# Altium footprint library FootPrintLib_11.PcbLib: 376 footprints (part 6 of 24)
Each footprint in its own frame and in the unit in brackets; x right, y up, seen from the top. Pads: shape width x height; smd on the part's side, far side on the other; paste and mask are expansions set on the pad; w line width, h text height; cw(c..) or ccw(c..) is an arc to the next point about the centre after c.
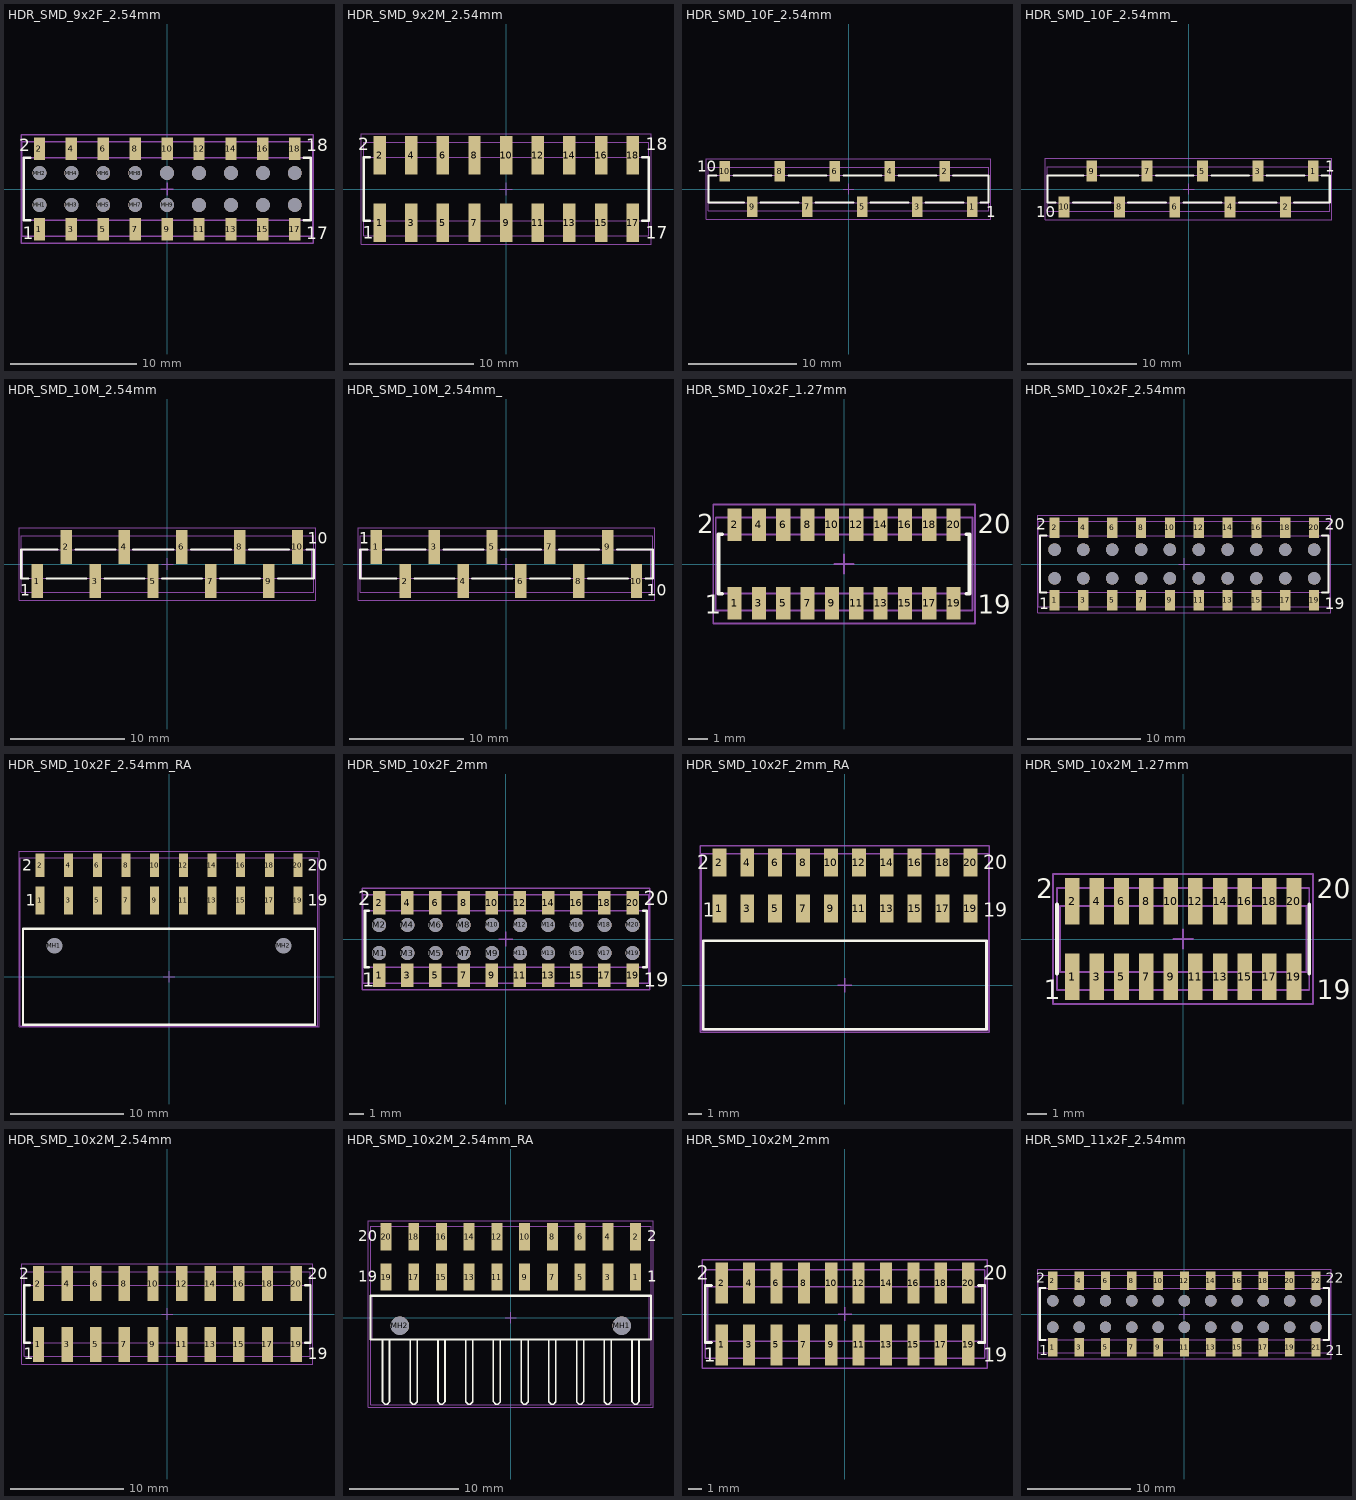
[diagram p5: the footprints below, top view; thin cyan lines are the x and y axes]

## HDR_SMD_9x2F_2.54mm [mm] "Socket Header, Pitch 2.54 mm, SMT, Vertical, dual row, 18p"
height 3.7
pads (36):
  rect 0.9x1.8 smd: 1(-10.16,-3.2) 2(-10.16,3.2) 3(-7.62,-3.2) 4(-7.62,3.2) 5(-5.08,-3.2) 6(-5.08,3.2) 7(-2.54,-3.2) 8(-2.54,3.2) 9(0,-3.2) 10(0,3.2) 11(2.54,-3.2) 12(2.54,3.2) 13(5.08,-3.2) 14(5.08,3.2) 15(7.62,-3.2) 16(7.62,3.2) 17(10.16,-3.2) 18(10.16,3.2)
  round 1.1 hole 1.1 unplated: MH1(-10.16,-1.27) MH2(-10.16,1.27) MH3(-7.62,-1.27) MH4(-7.62,1.27) MH5(-5.08,-1.27) MH6(-5.08,1.27) MH7(-2.54,-1.27) MH8(-2.54,1.27) MH9(0,-1.27) MH10(0,1.27) MH11(2.54,-1.27) MH12(2.54,1.27) MH13(5.08,-1.27) MH14(5.08,1.27) MH15(7.62,-1.27) MH16(7.62,1.27) MH17(10.16,-1.27) MH18(10.16,1.27)
Top Overlay:
  lines w0.2: -10.89,-2.5 -11.43,-2.5 -11.43,2.5 -10.89,2.5 ; 10.89,-2.5 11.43,-2.5 11.43,2.5 10.89,2.5
  text "2" at -11.79,3 h1
  text "1" at -11.49,-4 h1
  text "18" at 11.09,3 h1
  text "17" at 11.09,-4 h1
Mechanical 11:
  lines w0.1: -11.43,-2.5 11.43,-2.5 11.43,2.5 -11.43,2.5 -11.43,-2.5
Mechanical 13:
  lines w0.1: -11.58,-3.75 11.58,-3.75 11.58,3.75 -11.58,3.75 -11.58,-3.75
Mechanical 15:
  lines w0.1: -0.5,0 0.5,0 ; 0,-0.5 0,0.5 ; -11.63,-4.3 11.63,-4.3 11.63,4.3 -11.63,4.3 -11.63,-4.3
3D body "610018243021.stp": height 3.7, standoff 0, extent -11.43,-3.603 11.43,3.603

## HDR_SMD_9x2M_2.54mm [mm] "Pin Header, pitch 2.54 mm, SMD, Vertical, dual row, 18p"
height 9.6
pads (18):
  rect 1x3.1 smd: 1(-10.16,-2.7) 2(-10.16,2.7) 3(-7.62,-2.7) 4(-7.62,2.7) 5(-5.08,-2.7) 6(-5.08,2.7) 7(-2.54,-2.7) 8(-2.54,2.7) 9(0,-2.7) 10(0,2.7) 11(2.54,-2.7) 12(2.54,2.7) 13(5.08,-2.7) 14(5.08,2.7) 15(7.62,-2.7) 16(7.62,2.7) 17(10.16,-2.7) 18(10.16,2.7)
Top Overlay:
  lines w0.2: -10.94,-2.54 -11.43,-2.54 -11.43,2.54 -10.94,2.54 ; 10.94,-2.54 11.43,-2.54 11.43,2.54 10.94,2.54
  text "18" at 11.19,3.1 h1
  text "17" at 11.19,-4 h1
  text "1" at -11.49,-4 h1
  text "2" at -11.89,3.1 h1
Mechanical 11:
  lines w0.1: -11.43,-2.54 11.43,-2.54 11.43,2.54 -11.43,2.54 -11.43,-2.54
Mechanical 13:
  lines w0.1: -11.43,-3.75 -11.43,3.75 11.43,3.75 11.43,-3.75 -11.43,-3.75
Mechanical 15:
  lines w0.1: -0.5,0 0.5,0 ; 0,-0.5 0,0.5 ; -11.63,-4.45 -11.63,4.45 11.63,4.45 11.63,-4.45 -11.63,-4.45
3D body "61001821121.stp": height 9.62, standoff 0.02, extent -11.43,-3.75 11.43,3.75

## HDR_SMD_10F_2.54mm [mm] "Socket Header, Pitch 2.54 mm, SMT, Vertical, single row, 10p"
height 7.5
pads (10):
  rect 1x1.91 smd: 1(11.43,-1.645) 2(8.89,1.645) 3(6.35,-1.645) 4(3.81,1.645) 5(1.27,-1.645) 6(-1.27,1.645) 7(-3.81,-1.645) 8(-6.35,1.645) 9(-8.89,-1.645) 10(-11.43,1.645)
Top Overlay:
  lines w0.2: -12.22,1.25 -12.95,1.25 -12.95,-1.25 -9.67,-1.25 ; -10.62,1.25 -7.12,1.25 ; -8.12,-1.25 -4.62,-1.25 ; -5.54,1.25 -2.04,1.25 ; -3.04,-1.25 0.46,-1.25 ; -0.46,1.25 3.04,1.25 ; 2.04,-1.25 5.54,-1.25 ; 4.62,1.25 8.12,1.25 ; 7.12,-1.25 10.62,-1.25 ; 9.67,1.25 12.95,1.25 12.95,-1.25 12.22,-1.25
  text "1" at 12.72,-2.6 h1
  text "10" at -14,1.6 h1
Mechanical 11:
  lines w0.1: -12.95,-1.25 12.95,-1.25 12.95,1.25 -12.95,1.25 -12.95,-1.25
Mechanical 13:
  lines w0.1: -12.95,-2.025 12.95,-2.025 12.95,2.025 -12.95,2.025 -12.95,-2.025
Mechanical 15:
  lines w0.1: -0.5,0 0.5,0 ; 0,-0.5 0,0.5 ; -13.15,-2.8 13.15,-2.8 13.15,2.8 -13.15,2.8 -13.15,-2.8
3D body "61001011921.stp": height 7.5, standoff 0, extent -12.95,-2.025 12.95,2.025

## HDR_SMD_10F_2.54mm_ [mm] "Socket Header, Pitch 2.54 mm, SMT, Vertical, single row, 10p"
height 7.5
pads (10):
  rect 1x1.91 smd: 1(11.43,1.645) 2(8.89,-1.645) 3(6.35,1.645) 4(3.81,-1.645) 5(1.27,1.645) 6(-1.27,-1.645) 7(-3.81,1.645) 8(-6.35,-1.645) 9(-8.89,1.645) 10(-11.43,-1.645)
Top Overlay:
  lines w0.2: -12.22,-1.25 -12.95,-1.25 -12.95,1.25 -9.67,1.25 ; -10.62,-1.25 -7.17,-1.25 ; -8.07,1.25 -4.62,1.25 ; -5.54,-1.25 -2.09,-1.25 ; -2.99,1.25 0.46,1.25 ; -0.46,-1.25 2.99,-1.25 ; 2.09,1.25 5.54,1.25 ; 4.62,-1.25 8.07,-1.25 ; 7.17,1.25 10.62,1.25 ; 9.67,-1.25 12.95,-1.25 12.95,1.25 12.22,1.25
  text "1" at 12.52,1.6 h1
  text "10" at -14,-2.6 h1
Mechanical 11:
  lines w0.1: -12.95,-1.25 12.95,-1.25 12.95,1.25 -12.95,1.25 -12.95,-1.25
Mechanical 13:
  lines w0.1: -12.95,-2.025 -12.95,2.025 12.95,2.025 12.95,-2.025 -12.95,-2.025
Mechanical 15:
  lines w0.1: -0.5,0 0.5,0 ; 0,-0.5 0,0.5 ; -13.15,-2.8 -13.15,2.8 13.15,2.8 13.15,-2.8 -13.15,-2.8
3D body "61001013321.stp": height 7.5, standoff 0, extent -12.95,-2.025 12.95,2.025

## HDR_SMD_10M_2.54mm [mm] "Pin Header, pitch 2.54 mm, SMD, Vertical, single row, 10p"
height 9.3
pads (10):
  rect 1x3 smd: 1(-11.43,-1.5) 2(-8.89,1.5) 3(-6.35,-1.5) 4(-3.81,1.5) 5(-1.27,-1.5) 6(1.27,1.5) 7(3.81,-1.5) 8(6.35,1.5) 9(8.89,-1.5) 10(11.43,1.5)
Top Overlay:
  lines w0.2: -12.22,-1.27 -12.85,-1.27 -12.85,1.27 -9.67,1.27 ; -10.62,-1.27 -7.12,-1.27 ; -8.08,1.27 -4.58,1.27 ; -5.54,-1.27 -2.04,-1.27 ; -3,1.27 0.5,1.27 ; -0.46,-1.27 3.04,-1.27 ; 2.08,1.27 5.58,1.27 ; 4.62,-1.27 8.12,-1.27 ; 7.16,1.27 10.66,1.27 ; 9.72,-1.27 12.85,-1.27 12.85,1.27 12.22,1.27
  text "1" at -12.92,-2.8 h1
  text "10" at 12.32,1.8 h1
Mechanical 11:
  lines w0.1: -12.7,-1.27 12.7,-1.27 12.7,1.27 -12.7,1.27 -12.7,-1.27
Mechanical 13:
  lines w0.1: -12.85,-2.5 -12.85,2.5 12.85,2.5 12.85,-2.5 -12.85,-2.5
Mechanical 15:
  lines w0.1: -0.5,0 0.5,0 ; 0,-0.5 0,0.5 ; -13.05,-3.2 -13.05,3.2 13.05,3.2 13.05,-3.2 -13.05,-3.2
3D body "61001018221.stp": height 9.33, standoff 0, extent -12.7,-2.5 12.7,2.5

## HDR_SMD_10M_2.54mm_ [mm] "Pin Header, pitch 2.54 mm, SMD, Vertical, single row, 10p"
height 9.3
pads (10):
  rect 1x3 smd: 1(-11.43,1.5) 2(-8.89,-1.5) 3(-6.35,1.5) 4(-3.81,-1.5) 5(-1.27,1.5) 6(1.27,-1.5) 7(3.81,1.5) 8(6.35,-1.5) 9(8.89,1.5) 10(11.43,-1.5)
Top Overlay:
  lines w0.2: -12.22,1.27 -12.85,1.27 -12.85,-1.27 -9.67,-1.27 ; -10.62,1.27 -7.12,1.27 ; -8.08,-1.27 -4.58,-1.27 ; -5.54,1.27 -2.04,1.27 ; -3,-1.27 0.5,-1.27 ; -0.46,1.27 3.04,1.27 ; 2.08,-1.27 5.58,-1.27 ; 4.62,1.27 8.12,1.27 ; 7.16,-1.27 10.66,-1.27 ; 9.72,1.27 12.85,1.27 12.85,-1.27 12.22,-1.27
  text "10" at 12.32,-2.8 h1
  text "1" at -12.92,1.8 h1
Mechanical 11:
  lines w0.1: -12.7,-1.27 12.7,-1.27 12.7,1.27 -12.7,1.27 -12.7,-1.27
Mechanical 13:
  lines w0.1: -12.85,-2.5 -12.85,2.5 12.85,2.5 12.85,-2.5 -12.85,-2.5
Mechanical 15:
  lines w0.1: -0.5,0 0.5,0 ; 0,-0.5 0,0.5 ; -13.05,-3.2 -13.05,3.2 13.05,3.2 13.05,-3.2 -13.05,-3.2
3D body "61001018321.stp": height 9.37, standoff 0.04, extent -12.7,-2.5 12.7,2.5

## HDR_SMD_10x2F_1.27mm [mm] "Socket Header, Pitch 1.27 mm, SMT, Vertical, dual row, 20p"
height 4.7
pads (20):
  rect 0.74x1.7 smd: 1(-5.715,-2.05) 2(-5.715,2.05) 3(-4.445,-2.05) 4(-4.445,2.05) 5(-3.175,-2.05) 6(-3.175,2.05) 7(-1.905,-2.05) 8(-1.905,2.05) 9(-0.635,-2.05) 10(-0.635,2.05) 11(0.635,-2.05) 12(0.635,2.05) 13(1.905,-2.05) 14(1.905,2.05) 15(3.175,-2.05) 16(3.175,2.05) 17(4.445,-2.05) 18(4.445,2.05) 19(5.715,-2.05) 20(5.715,2.05)
Top Overlay:
  lines w0.2: -6.38,-1.55 -6.55,-1.55 -6.55,1.55 -6.38,1.55 ; 6.38,-1.55 6.55,-1.55 6.55,1.55 6.38,1.55
  text "20" at 6.98,1.6 h1
  text "19" at 6.98,-2.6 h1
  text "1" at -7.28,-2.6 h1
  text "2" at -7.68,1.6 h1
Mechanical 11:
  lines w0.1: -6.55,-1.55 6.55,-1.55 6.55,1.55 -6.55,1.55 -6.55,-1.55
Mechanical 13:
  lines w0.1: -6.7,-2.425 -6.7,2.425 6.7,2.425 6.7,-2.425 -6.7,-2.425
Mechanical 15:
  lines w0.1: -0.5,0 0.5,0 ; 0,-0.5 0,0.5 ; -6.83,-3.1 -6.83,3.1 6.83,3.1 6.83,-3.1 -6.83,-3.1
3D body "62302021021.stp": height 4.6, standoff 0, extent -6.55,-2.299 6.55,2.299

## HDR_SMD_10x2F_2.54mm [mm] "Socket Header, Pitch 2.54 mm, SMT, Vertical, dual row, 20p"
height 3.7
pads (40):
  rect 0.9x1.8 smd: 1(-11.43,-3.2) 2(-11.43,3.2) 3(-8.89,-3.2) 4(-8.89,3.2) 5(-6.35,-3.2) 6(-6.35,3.2) 7(-3.81,-3.2) 8(-3.81,3.2) 9(-1.27,-3.2) 10(-1.27,3.2) 11(1.27,-3.2) 12(1.27,3.2) 13(3.81,-3.2) 14(3.81,3.2) 15(6.35,-3.2) 16(6.35,3.2) 17(8.89,-3.2) 18(8.89,3.2) 19(11.43,-3.2) 20(11.43,3.2)
  round 1.1 hole 1.1 unplated: MH1(-11.43,-1.27) MH2(-11.43,1.27) MH3(-8.89,-1.27) MH4(-8.89,1.27) MH5(-6.35,-1.27) MH6(-6.35,1.27) MH7(-3.81,-1.27) MH8(-3.81,1.27) MH9(-1.27,-1.27) MH10(-1.27,1.27) MH11(1.27,-1.27) MH12(1.27,1.27) MH13(3.81,-1.27) MH14(3.81,1.27) MH15(6.35,-1.27) MH16(6.35,1.27) MH17(8.89,-1.27) MH18(8.89,1.27) MH19(11.43,-1.27) MH20(11.43,1.27)
Top Overlay:
  lines w0.2: -12.16,-2.5 -12.7,-2.5 -12.7,2.5 -12.16,2.5 ; 12.16,-2.5 12.7,-2.5 12.7,2.5 12.16,2.5
  text "2" at -13.06,3 h1
  text "1" at -12.76,-4 h1
  text "20" at 12.36,3 h1
  text "19" at 12.36,-4 h1
Mechanical 11:
  lines w0.1: -12.7,-2.5 12.7,-2.5 12.7,2.5 -12.7,2.5 -12.7,-2.5
Mechanical 13:
  lines w0.1: -12.85,-3.75 12.85,-3.75 12.85,3.75 -12.85,3.75 -12.85,-3.75
Mechanical 15:
  lines w0.1: -0.5,0 0.5,0 ; 0,-0.5 0,0.5 ; -12.9,-4.3 12.9,-4.3 12.9,4.3 -12.9,4.3 -12.9,-4.3
3D body "610020243021.stp": height 3.7, standoff 0, extent -12.7,-3.603 12.7,3.603

## HDR_SMD_10x2F_2.54mm_RA [mm] "Socket Header, Pitch 2.54 mm, SMT, Angled, dual row, 20p"
height 5.2
pads (22):
  rect 0.8x2.5 smd: 1(-11.43,6.76) 3(-8.89,6.76) 5(-6.35,6.76) 7(-3.81,6.76) 9(-1.27,6.76) 11(1.27,6.76) 13(3.81,6.76) 15(6.35,6.76) 17(8.89,6.76) 19(11.43,6.76)
  rect 0.8x2.1 smd: 2(-11.43,9.89) 4(-8.89,9.89) 6(-6.35,9.89) 8(-3.81,9.89) 10(-1.27,9.89) 12(1.27,9.89) 14(3.81,9.89) 16(6.35,9.89) 18(8.89,9.89) 20(11.43,9.89)
  round 1.3 hole 1.4 unplated: MH1(-10.16,2.75) MH2(10.16,2.75)
Top Overlay:
  lines w0.2: -12.95,-4.25 -12.95,4.25 12.95,4.25 12.95,-4.25 -12.95,-4.25
  text "20" at 12.29,9.4 h1
  text "19" at 12.29,6.3 h1
  text "2" at -12.99,9.4 h1
  text "1" at -12.69,6.3 h1
Mechanical 11:
  lines w0.1: -12.95,-4.25 -12.95,4.25 12.95,4.25 12.95,-4.25 -12.95,-4.25
Mechanical 13:
  lines w0.1: -13.2,-4.35 -13.2,10.54 13.2,10.54 13.2,-4.35 -13.2,-4.35
Mechanical 15:
  lines w0.1: -0.5,0 0.5,0 ; 0,-0.5 0,0.5 ; -13.3,-4.45 -13.3,11.14 13.3,11.14 13.3,-4.45 -13.3,-4.45
3D body "610120249221.stp": height 5.03, standoff -1.27, extent -12.95,-4.25 12.95,10.44

## HDR_SMD_10x2F_2mm [mm] "Socket Header, Pitch 2.00 mm, SMT, Vertical, dual row, 20p"
height 2.35
pads (40):
  rect 0.89x1.65 smd: 1(-9,-2.575) 2(-9,2.575) 3(-7,-2.575) 4(-7,2.575) 5(-5,-2.575) 6(-5,2.575) 7(-3,-2.575) 8(-3,2.575) 9(-1,-2.575) 10(-1,2.575) 11(1,-2.575) 12(1,2.575) 13(3,-2.575) 14(3,2.575) 15(5,-2.575) 16(5,2.575) 17(7,-2.575) 18(7,2.575) 19(9,-2.575) 20(9,2.575)
  round 1 hole 1 unplated: M1(-9,-1) M2(-9,1) M3(-7,-1) M4(-7,1) M5(-5,-1) M6(-5,1) M7(-3,-1) M8(-3,1) M9(-1,-1) M10(-1,1) M11(1,-1) M12(1,1) M13(3,-1) M14(3,1) M15(5,-1) M16(5,1) M17(7,-1) M18(7,1) M19(9,-1) M20(9,1)
Top Overlay:
  lines w0.2: -9.75,-2 -10,-2 -10,2 -9.75,2 ; 9.75,-2 10,-2 10,2 9.75,2
  text "1" at -10.2,-3.4 h1
  text "2" at -10.5,2.4 h1
  text "19" at 9.8,-3.4 h1
  text "20" at 9.8,2.4 h1
Mechanical 11:
  lines w0.1: -10,-2 10,-2 10,2 -10,2 -10,-2
Mechanical 13:
  lines w0.1: -10.15,-3.125 10.15,-3.125 10.15,3.125 -10.15,3.125 -10.15,-3.125
Mechanical 15:
  lines w0.1: -0.5,0 0.5,0 ; 0,-0.5 0,0.5 ; -10.2,-3.6 10.2,-3.6 10.2,3.6 -10.2,3.6 -10.2,-3.6
3D body "62102021821.stp": height 2.1, standoff 0, extent -10,-3 10,3

## HDR_SMD_10x2F_2mm_RA [mm] "Socket Header, Pitch 2.00 mm, SMT, Angled, dual row, 20p"
height 4.15
pads (20):
  rect 1x2 smd: 1(-9,5.475) 2(-9,8.775) 3(-7,5.475) 4(-7,8.775) 5(-5,5.475) 6(-5,8.775) 7(-3,5.475) 8(-3,8.775) 9(-1,5.475) 10(-1,8.775) 11(1,5.475) 12(1,8.775) 13(3,5.475) 14(3,8.775) 15(5,5.475) 16(5,8.775) 17(7,5.475) 18(7,8.775) 19(9,5.475) 20(9,8.775)
Top Overlay:
  lines w0.2: -10.15,-3.175 10.15,-3.175 10.15,3.175 -10.15,3.175 -10.15,-3.175
  text "19" at 9.9,4.9 h1
  text "20" at 9.9,8.3 h1
  text "2" at -10.6,8.3 h1
  text "1" at -10.2,4.9 h1
Mechanical 11:
  lines w0.1: -10.15,-3.175 -10.15,3.175 10.15,3.175 10.15,-3.175 -10.15,-3.175
Mechanical 13:
  lines w0.1: -10.3,-3.25 10.3,-3.25 10.3,9.4 -10.3,9.4 -10.3,-3.25
Mechanical 15:
  lines w0.1: -0.5,0 0.5,0 ; 0,-0.5 0,0.5 ; -10.35,-3.375 -10.35,9.975 10.35,9.975 10.35,-3.375 -10.35,-3.375
3D body "621120284621.stp": height 4.05, standoff 0.05, extent -10.15,-3.175 10.15,9.275

## HDR_SMD_10x2M_1.27mm [mm] "Pin Header, pitch 1.27 mm, SMD, Vertical, dual row, 20p"
height 6.1
pads (20):
  rect 0.75x2.4 smd: 1(-5.715,-1.95) 2(-5.715,1.95) 3(-4.445,-1.95) 4(-4.445,1.95) 5(-3.175,-1.95) 6(-3.175,1.95) 7(-1.905,-1.95) 8(-1.905,1.95) 9(-0.635,-1.95) 10(-0.635,1.95) 11(0.635,-1.95) 12(0.635,1.95) 13(1.905,-1.95) 14(1.905,1.95) 15(3.175,-1.95) 16(3.175,1.95) 17(4.445,-1.95) 18(4.445,1.95) 19(5.715,-1.95) 20(5.715,1.95)
Top Overlay:
  lines w0.2: -6.5,-1.775 -6.5,1.775 ; 6.5,-1.775 6.5,1.775
  text "2" at -7.58,2.1 h1
  text "1" at -7.18,-3.1 h1
  text "19" at 6.88,-3.1 h1
  text "20" at 6.88,2.1 h1
Mechanical 11:
  lines w0.1: -6.35,-1.7 6.35,-1.7 6.35,1.7 -6.35,1.7 -6.35,-1.7
Mechanical 13:
  lines w0.1: -6.5,-2.625 -6.5,2.625 6.5,2.625 6.5,-2.625 -6.5,-2.625
Mechanical 15:
  lines w0.1: -0.5,0 0.5,0 ; 0,-0.5 0,0.5 ; -6.7,-3.35 -6.7,3.35 6.7,3.35 6.7,-3.35 -6.7,-3.35
3D body "62132021021.stp": height 5.9, standoff 0, extent -6.35,-2.55 6.35,2.55

## HDR_SMD_10x2M_2.54mm [mm] "Pin Header, pitch 2.54 mm, SMD, Vertical, dual row, 20p"
height 9.6
pads (20):
  rect 1x3.1 smd: 1(-11.43,-2.7) 2(-11.43,2.7) 3(-8.89,-2.7) 4(-8.89,2.7) 5(-6.35,-2.7) 6(-6.35,2.7) 7(-3.81,-2.7) 8(-3.81,2.7) 9(-1.27,-2.7) 10(-1.27,2.7) 11(1.27,-2.7) 12(1.27,2.7) 13(3.81,-2.7) 14(3.81,2.7) 15(6.35,-2.7) 16(6.35,2.7) 17(8.89,-2.7) 18(8.89,2.7) 19(11.43,-2.7) 20(11.43,2.7)
Top Overlay:
  lines w0.2: -12.21,-2.54 -12.7,-2.54 -12.7,2.54 -12.21,2.54 ; 12.21,-2.54 12.7,-2.54 12.7,2.54 12.21,2.54
  text "2" at -13.16,3.1 h1
  text "1" at -12.76,-4 h1
  text "19" at 12.46,-4 h1
  text "20" at 12.46,3.1 h1
Mechanical 11:
  lines w0.1: -12.7,-2.54 -12.7,2.54 12.7,2.54 12.7,-2.54 -12.7,-2.54
Mechanical 13:
  lines w0.1: -12.7,-3.75 12.7,-3.75 12.7,3.75 -12.7,3.75 -12.7,-3.75
Mechanical 15:
  lines w0.1: -0.5,0 0.5,0 ; 0,-0.5 0,0.5 ; -12.9,-4.45 12.9,-4.45 12.9,4.45 -12.9,4.45 -12.9,-4.45
3D body "61002021121.stp": height 9.62, standoff 0.02, extent -12.7,-3.75 12.7,3.75

## HDR_SMD_10x2M_2.54mm_RA [mm] "Pin Header, pitch 2.54 mm, SMD, Angled, dual row, 20p"
height 5.08
pads (22):
  rect 1x2.5 smd: 1(11.43,3.72) 2(11.43,7.42) 3(8.89,3.72) 4(8.89,7.42) 5(6.35,3.72) 6(6.35,7.42) 7(3.81,3.72) 8(3.81,7.42) 9(1.27,3.72) 10(1.27,7.42) 11(-1.27,3.72) 12(-1.27,7.42) 13(-3.81,3.72) 14(-3.81,7.42) 15(-6.35,3.72) 16(-6.35,7.42) 17(-8.89,3.72) 18(-8.89,7.42) 19(-11.43,3.72) 20(-11.43,7.42)
  round 1.68 hole 1.68 unplated: MH1(10.16,-0.73) MH2(-10.16,-0.73)
Top Overlay:
  lines w0.15: -11.75,-2 -11.75,-7.3 -11.75,-7.58 -11.75,-7.705 -11.53,-7.925 -11.33,-7.925 -11.11,-7.705 -11.11,-7.58 -11.11,-7.3 -11.11,-2 ; -9.21,-2 -9.21,-7.3 -9.21,-7.58 -9.21,-7.705 -8.99,-7.925 -8.79,-7.925 -8.57,-7.705 -8.57,-7.58 -8.57,-7.3 -8.57,-2 ; -6.67,-2 -6.67,-7.3 -6.67,-7.58 -6.67,-7.705 -6.45,-7.925 -6.25,-7.925 -6.03,-7.705 -6.03,-7.58 -6.03,-7.3 -6.03,-2 ; -4.13,-2 -4.13,-7.3 -4.13,-7.58 -4.13,-7.705 -3.91,-7.925 -3.71,-7.925 -3.49,-7.705 -3.49,-7.58 -3.49,-7.3 -3.49,-2 ; -1.59,-2 -1.59,-7.3 -1.59,-7.58 -1.59,-7.705 -1.37,-7.925 -1.17,-7.925 -0.95,-7.705 -0.95,-7.58 -0.95,-7.3 -0.95,-2 ; 0.95,-2 0.95,-7.3 0.95,-7.58 0.95,-7.705 1.17,-7.925 1.37,-7.925 1.59,-7.705 1.59,-7.58 1.59,-7.3 1.59,-2 ; 3.49,-2 3.49,-7.3 3.49,-7.58 3.49,-7.705 3.71,-7.925 3.91,-7.925 4.13,-7.705 4.13,-7.58 4.13,-7.3 4.13,-2 ; 6.03,-2 6.03,-7.3 6.03,-7.58 6.03,-7.705 6.25,-7.925 6.45,-7.925 6.67,-7.705 6.67,-7.58 6.67,-7.3 6.67,-2 ; 8.57,-2 8.57,-7.3 8.57,-7.58 8.57,-7.705 8.79,-7.925 8.99,-7.925 9.21,-7.705 9.21,-7.58 9.21,-7.3 9.21,-2 ; 11.11,-2 11.11,-7.3 11.11,-7.58 11.11,-7.705 11.33,-7.925 11.53,-7.925 11.75,-7.705 11.75,-7.58 11.75,-7.3 11.75,-2
  lines w0.2: -12.85,-2 -12.85,2 12.85,2 12.85,-2 -12.85,-2
  text "2" at 12.49,7 h1
  text "1" at 12.49,3.3 h1
  text "20" at -14,7 h1
  text "19" at -14,3.3 h1
Mechanical 11:
  lines w0.1: -12.7,-2 -12.7,2 12.7,2 12.7,-2 -12.7,-2
Mechanical 13:
  lines w0.1: -12.85,-8 -12.85,8.36 12.85,8.36 12.85,-8 -12.85,-8
Mechanical 15:
  lines w0.1: -0.5,0 0.5,0 ; 0,-0.5 0,0.5 ; -13.05,-8.2 13.05,-8.2 13.05,8.87 -13.05,8.87 -13.05,-8.2
3D body "610120249121.stp": height 5.1, standoff -1.38, extent -12.7,-8 12.7,8.16

## HDR_SMD_10x2M_2mm [mm] "Pin Header, pitch 2.00 mm, SMD, Vertical, dual row, 20p"
height 6.8
pads (20):
  rect 0.89x3 smd: 1(-9,-2.25) 2(-9,2.25) 3(-7,-2.25) 4(-7,2.25) 5(-5,-2.25) 6(-5,2.25) 7(-3,-2.25) 8(-3,2.25) 9(-1,-2.25) 10(-1,2.25) 11(1,-2.25) 12(1,2.25) 13(3,-2.25) 14(3,2.25) 15(5,-2.25) 16(5,2.25) 17(7,-2.25) 18(7,2.25) 19(9,-2.25) 20(9,2.25)
Top Overlay:
  lines w0.2: -9.75,-2.075 -10.2,-2.075 -10.2,2.075 -9.75,2.075 ; 9.75,-2.075 10.2,-2.075 10.2,2.075 9.75,2.075
  text "1" at -10.3,-3.5 h1
  text "2" at -10.8,2.5 h1
  text "20" at 10.1,2.5 h1
  text "19" at 10.1,-3.5 h1
Mechanical 11:
  lines w0.1: -10,-2 10,-2 10,2 -10,2 -10,-2
Mechanical 13:
  lines w0.1: -10.2,-3.225 -10.2,3.225 10.2,3.225 10.2,-3.225 -10.2,-3.225
Mechanical 15:
  lines w0.1: -0.5,0 0.5,0 ; 0,-0.5 0,0.5 ; -10.4,-3.95 -10.4,3.95 10.4,3.95 10.4,-3.95 -10.4,-3.95
3D body "62132021921.stp": height 6.7, standoff 0, extent -10,-3.1 10,3.1

## HDR_SMD_11x2F_2.54mm [mm] "Socket Header, Pitch 2.54 mm, SMT, Vertical, dual row, 22p"
height 3.7
pads (44):
  rect 0.9x1.8 smd: 1(-12.7,-3.2) 2(-12.7,3.2) 3(-10.16,-3.2) 4(-10.16,3.2) 5(-7.62,-3.2) 6(-7.62,3.2) 7(-5.08,-3.2) 8(-5.08,3.2) 9(-2.54,-3.2) 10(-2.54,3.2) 11(0,-3.2) 12(0,3.2) 13(2.54,-3.2) 14(2.54,3.2) 15(5.08,-3.2) 16(5.08,3.2) 17(7.62,-3.2) 18(7.62,3.2) 19(10.16,-3.2) 20(10.16,3.2) 21(12.7,-3.2) 22(12.7,3.2)
  round 1.1 hole 1.1 unplated: MH1(-12.7,-1.27) MH2(-12.7,1.27) MH3(-10.16,-1.27) MH4(-10.16,1.27) MH5(-7.62,-1.27) MH6(-7.62,1.27) MH7(-5.08,-1.27) MH8(-5.08,1.27) MH9(-2.54,-1.27) MH10(-2.54,1.27) MH11(0,-1.27) MH12(0,1.27) MH13(2.54,-1.27) MH14(2.54,1.27) MH15(5.08,-1.27) MH16(5.08,1.27) MH17(7.62,-1.27) MH18(7.62,1.27) MH19(10.16,-1.27) MH20(10.16,1.27) MH21(12.7,-1.27) MH22(12.7,1.27)
Top Overlay:
  lines w0.2: -13.43,-2.5 -13.97,-2.5 -13.97,2.5 -13.43,2.5 ; 13.43,-2.5 13.97,-2.5 13.97,2.5 13.43,2.5
  text "21" at 13.63,-4 h1
  text "22" at 13.63,3 h1
  text "1" at -14.03,-4 h1
  text "2" at -14.33,3 h1
Mechanical 11:
  lines w0.1: -13.97,-2.5 -13.97,2.5 13.97,2.5 13.97,-2.5 -13.97,-2.5
Mechanical 13:
  lines w0.1: -14.12,-3.75 -14.12,3.75 14.12,3.75 14.12,-3.75 -14.12,-3.75
Mechanical 15:
  lines w0.1: -0.5,0 0.5,0 ; 0,-0.5 0,0.5 ; -14.17,-4.3 -14.17,4.3 14.17,4.3 14.17,-4.3 -14.17,-4.3
3D body "610022243021.stp": height 3.7, standoff 0, extent -13.97,-3.603 13.97,3.603